# Altium schematic symbol library NHD-0216K1Z-FSB-FBW-L.SchLib: 1 symbol
Pins are listed as number, name and electrical type; pins without a type are passive.

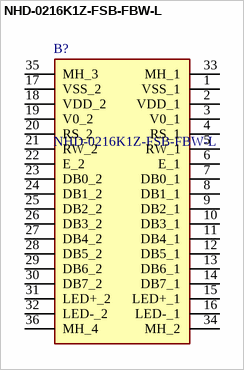
[diagram p0: symbol NHD-0216K1Z-FSB-FBW-L]

## NHD-0216K1Z-FSB-FBW-L
designator B?
Character Display Module Transflective 5 x 8 Dots FSTN - Film Super-Twisted Nematic LED - Blue Parallel 80.00mm x 36.00mm x 13.50mm,-20C ~ 70C; Manufacturer_Name: Newhaven Display; Geometry.Height: 13.5mm; Mouser Part Number: 763-0216K1Z-FSB-FBW; Mouser Price/Stock: https://www.mouser.co.uk/ProductDetail/Newhaven-Display/NHD-0216K1Z-FSB-FBW-L?qs=3vk7fz9CmNz%2FJwPuhj3GIw%3D%3D; Manufacturer_Part_Number: NHD-0216K1Z-FSB-FBW-L; Datasheet Link: https://www.digikey.com/en/products/detail/newhaven-display-intl/NHD-0216K1Z-FSB-FBW-L/1701181?msockid=07b6a70c65cf63c135a0b17364d56200
footprint NHD0216K1ZFSBFBWL
pins: 1 VSS_1, 2 VDD_1, 3 V0_1, 4 RS_1, 5 RW_1, 6 E_1, 7 DB0_1, 8 DB1_1, 9 DB2_1, 10 DB3_1, 11 DB4_1, 12 DB5_1, 13 DB6_1, 14 DB7_1, 15 LED+_1, 16 LED-_1, 17 VSS_2, 18 VDD_2, 19 V0_2, 20 RS_2, 21 RW_2, 22 E_2, 23 DB0_2, 24 DB1_2, 25 DB2_2, 26 DB3_2, 27 DB4_2, 28 DB5_2, 29 DB6_2, 30 DB7_2, 31 LED+_2, 32 LED-_2, 33 MH_1, 34 MH_2, 35 MH_3, 36 MH_4